# Altium schematic symbol library SG2002_QFN88_Library.SchLib: 1 symbol
Pins are listed as number, name and electrical type; pins without a type are passive.

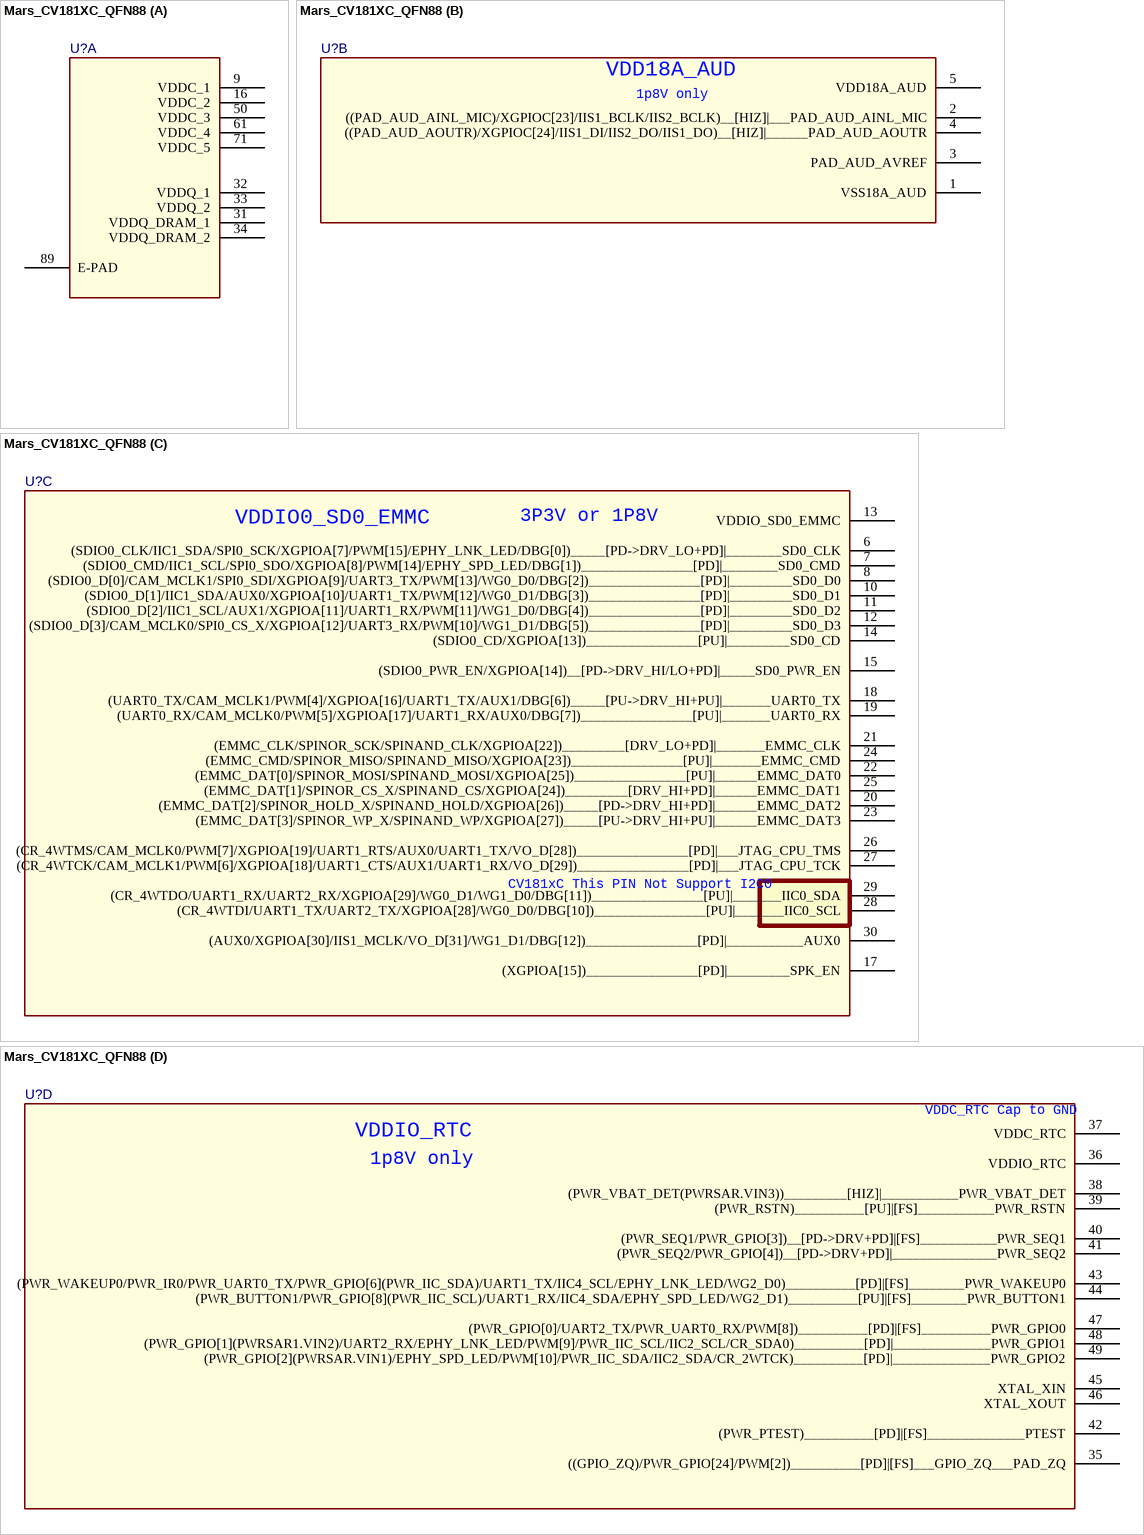
[diagram p0: symbol Mars_CV181XC_QFN88]

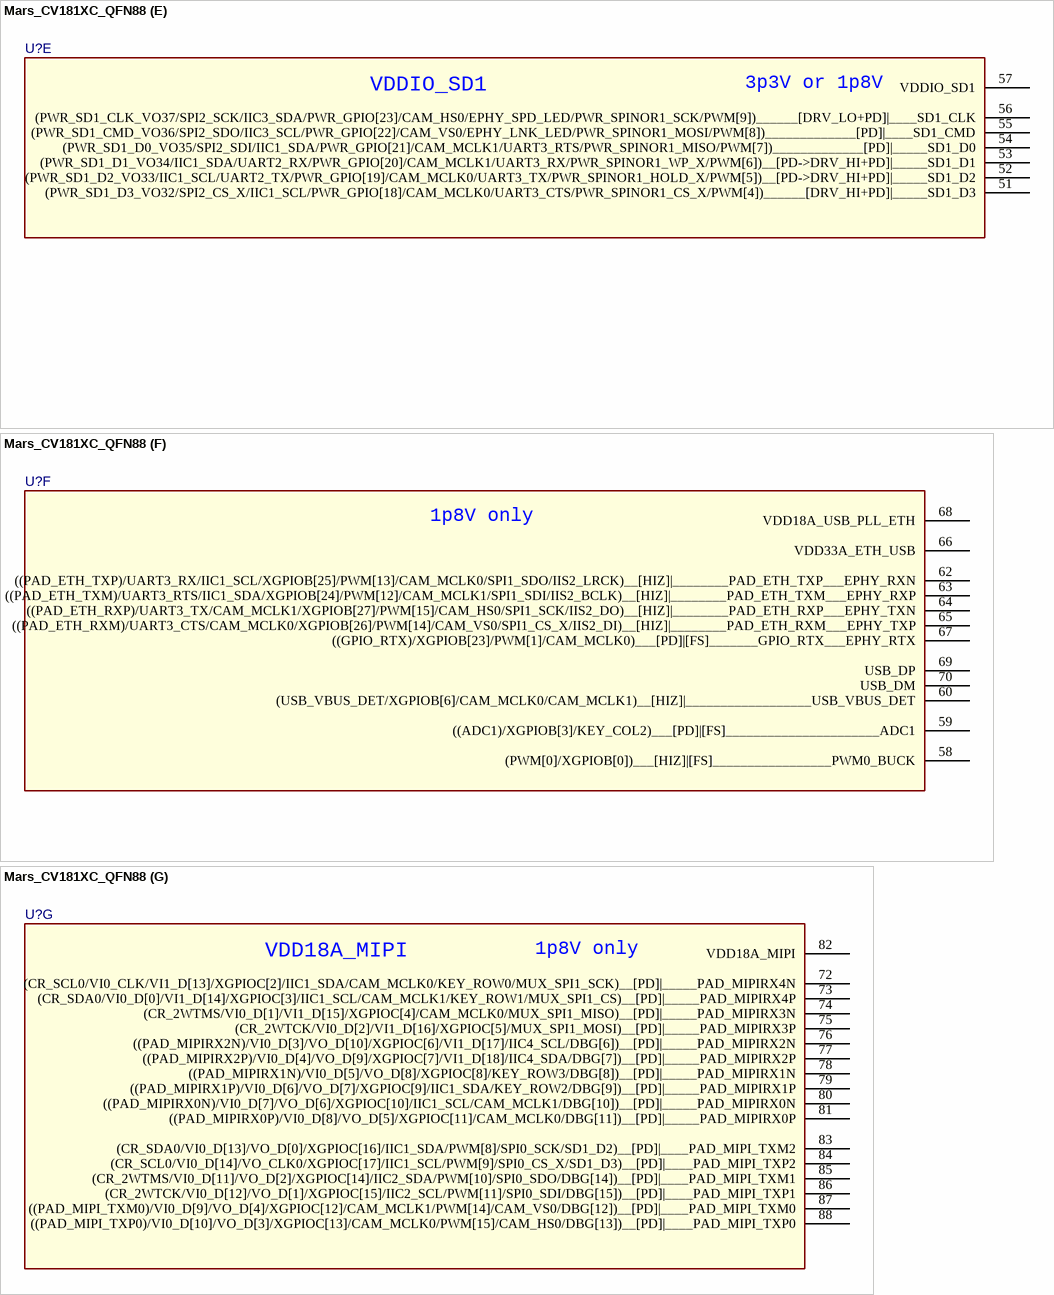
[diagram p1: symbol Mars_CV181XC_QFN88]

## Mars_CV181XC_QFN88
designator U?
SWAP_INFO: (S1+S2+S3+S4+S5+S6+S7); SPLIT_INST: TRUE
part A pins: 9 VDDC_1 (power), 16 VDDC_2 (power), 31 VDDQ_DRAM_1 (power), 32 VDDQ_1 (power), 33 VDDQ_2 (power), 34 VDDQ_DRAM_2 (power), 50 VDDC_3 (power), 61 VDDC_4 (power), 71 VDDC_5 (power), 89 E-PAD (power)
part B pins: 1 VSS18A_AUD, 2 ((PAD_AUD_AINL_MIC)/XGPIOC[23]/IIS1_BCLK/IIS2_BCLK)__[HIZ]|___PAD_AUD_AINL_MIC, 3 PAD_AUD_AVREF, 4 ((PAD_AUD_AOUTR)/XGPIOC[24]/IIS1_DI/IIS2_DO/IIS1_DO)__[HIZ]|______PAD_AUD_AOUTR, 5 VDD18A_AUD (power)
part C pins: 6 (SDIO0_CLK/IIC1_SDA/SPI0_SCK/XGPIOA[7]/PWM[15]/EPHY_LNK_LED/DBG[0])_____[PD->DRV_LO+PD]|________SD0_CLK, 7 (SDIO0_CMD/IIC1_SCL/SPI0_SDO/XGPIOA[8]/PWM[14]/EPHY_SPD_LED/DBG[1])________________[PD]|________SD0_CMD, 8 (SDIO0_D[0]/CAM_MCLK1/SPI0_SDI/XGPIOA[9]/UART3_TX/PWM[13]/WG0_D0/DBG[2])________________[PD]|_________SD0_D0, 10 (SDIO0_D[1]/IIC1_SDA/AUX0/XGPIOA[10]/UART1_TX/PWM[12]/WG0_D1/DBG[3])________________[PD]|_________SD0_D1, 11 (SDIO0_D[2]/IIC1_SCL/AUX1/XGPIOA[11]/UART1_RX/PWM[11]/WG1_D0/DBG[4])________________[PD]|_________SD0_D2, 12 (SDIO0_D[3]/CAM_MCLK0/SPI0_CS_X/XGPIOA[12]/UART3_RX/PWM[10]/WG1_D1/DBG[5])________________[PD]|_________SD0_D3, 13 VDDIO_SD0_EMMC (power), 14 (SDIO0_CD/XGPIOA[13])________________[PU]|_________SD0_CD, 15 (SDIO0_PWR_EN/XGPIOA[14])__[PD->DRV_HI/LO+PD]|_____SD0_PWR_EN, 17 (XGPIOA[15])________________[PD]|_________SPK_EN, 18 (UART0_TX/CAM_MCLK1/PWM[4]/XGPIOA[16]/UART1_TX/AUX1/DBG[6])_____[PU->DRV_HI+PU]|_______UART0_TX, 19 (UART0_RX/CAM_MCLK0/PWM[5]/XGPIOA[17]/UART1_RX/AUX0/DBG[7])________________[PU]|_______UART0_RX, 20 (EMMC_DAT[2]/SPINOR_HOLD_X/SPINAND_HOLD/XGPIOA[26])_____[PD->DRV_HI+PD]|______EMMC_DAT2, 21 (EMMC_CLK/SPINOR_SCK/SPINAND_CLK/XGPIOA[22])_________[DRV_LO+PD]|_______EMMC_CLK, 22 (EMMC_DAT[0]/SPINOR_MOSI/SPINAND_MOSI/XGPIOA[25])________________[PU]|______EMMC_DAT0, 23 (EMMC_DAT[3]/SPINOR_WP_X/SPINAND_WP/XGPIOA[27])_____[PU->DRV_HI+PU]|______EMMC_DAT3, 24 (EMMC_CMD/SPINOR_MISO/SPINAND_MISO/XGPIOA[23])________________[PU]|_______EMMC_CMD, 25 (EMMC_DAT[1]/SPINOR_CS_X/SPINAND_CS/XGPIOA[24])_________[DRV_HI+PD]|______EMMC_DAT1, 26 (CR_4WTMS/CAM_MCLK0/PWM[7]/XGPIOA[19]/UART1_RTS/AUX0/UART1_TX/VO_D[28])________________[PD]|___JTAG_CPU_TMS, 27 (CR_4WTCK/CAM_MCLK1/PWM[6]/XGPIOA[18]/UART1_CTS/AUX1/UART1_RX/VO_D[29])________________[PD]|___JTAG_CPU_TCK, 28 (CR_4WTDI/UART1_TX/UART2_TX/XGPIOA[28]/WG0_D0/DBG[10])________________[PU]|_______IIC0_SCL, 29 (CR_4WTDO/UART1_RX/UART2_RX/XGPIOA[29]/WG0_D1/WG1_D0/DBG[11])________________[PU]|_______IIC0_SDA, 30 (AUX0/XGPIOA[30]/IIS1_MCLK/VO_D[31]/WG1_D1/DBG[12])________________[PD]|___________AUX0
part D pins: 35 ((GPIO_ZQ)/PWR_GPIO[24]/PWM[2])__________[PD]|[FS]___GPIO_ZQ___PAD_ZQ, 36 VDDIO_RTC (power), 37 VDDC_RTC (power), 38 (PWR_VBAT_DET(PWRSAR.VIN3))_________[HIZ]|___________PWR_VBAT_DET, 39 (PWR_RSTN)__________[PU]|[FS]___________PWR_RSTN, 40 (PWR_SEQ1/PWR_GPIO[3])__[PD->DRV+PD]|[FS]___________PWR_SEQ1, 41 (PWR_SEQ2/PWR_GPIO[4])__[PD->DRV+PD]|_______________PWR_SEQ2, 42 (PWR_PTEST)__________[PD]|[FS]______________PTEST, 43 (PWR_WAKEUP0/PWR_IR0/PWR_UART0_TX/PWR_GPIO[6](PWR_IIC_SDA)/UART1_TX/IIC4_SCL/EPHY_LNK_LED/WG2_D0)__________[PD]|[FS]________PWR_WAKEUP0, 44 (PWR_BUTTON1/PWR_GPIO[8](PWR_IIC_SCL)/UART1_RX/IIC4_SDA/EPHY_SPD_LED/WG2_D1)__________[PU]|[FS]________PWR_BUTTON1, 45 XTAL_XIN, 46 XTAL_XOUT, 47 (PWR_GPIO[0]/UART2_TX/PWR_UART0_RX/PWM[8])__________[PD]|[FS]__________PWR_GPIO0, 48 (PWR_GPIO[1](PWRSAR1.VIN2)/UART2_RX/EPHY_LNK_LED/PWM[9]/PWR_IIC_SCL/IIC2_SCL/CR_SDA0)__________[PD]|______________PWR_GPIO1, 49 (PWR_GPIO[2](PWRSAR.VIN1)/EPHY_SPD_LED/PWM[10]/PWR_IIC_SDA/IIC2_SDA/CR_2WTCK)__________[PD]|______________PWR_GPIO2
part E pins: 51 (PWR_SD1_D3_VO32/SPI2_CS_X/IIC1_SCL/PWR_GPIO[18]/CAM_MCLK0/UART3_CTS/PWR_SPINOR1_CS_X/PWM[4])______[DRV_HI+PD]|_____SD1_D3, 52 (PWR_SD1_D2_VO33/IIC1_SCL/UART2_TX/PWR_GPIO[19]/CAM_MCLK0/UART3_TX/PWR_SPINOR1_HOLD_X/PWM[5])__[PD->DRV_HI+PD]|_____SD1_D2, 53 (PWR_SD1_D1_VO34/IIC1_SDA/UART2_RX/PWR_GPIO[20]/CAM_MCLK1/UART3_RX/PWR_SPINOR1_WP_X/PWM[6])__[PD->DRV_HI+PD]|_____SD1_D1, 54 (PWR_SD1_D0_VO35/SPI2_SDI/IIC1_SDA/PWR_GPIO[21]/CAM_MCLK1/UART3_RTS/PWR_SPINOR1_MISO/PWM[7])_____________[PD]|_____SD1_D0, 55 (PWR_SD1_CMD_VO36/SPI2_SDO/IIC3_SCL/PWR_GPIO[22]/CAM_VS0/EPHY_LNK_LED/PWR_SPINOR1_MOSI/PWM[8])_____________[PD]|____SD1_CMD, 56 (PWR_SD1_CLK_VO37/SPI2_SCK/IIC3_SDA/PWR_GPIO[23]/CAM_HS0/EPHY_SPD_LED/PWR_SPINOR1_SCK/PWM[9])______[DRV_LO+PD]|____SD1_CLK, 57 VDDIO_SD1 (power)
part F pins: 58 (PWM[0]/XGPIOB[0])___[HIZ]|[FS]_________________PWM0_BUCK, 59 ((ADC1)/XGPIOB[3]/KEY_COL2)___[PD]|[FS]______________________ADC1, 60 (USB_VBUS_DET/XGPIOB[6]/CAM_MCLK0/CAM_MCLK1)__[HIZ]|__________________USB_VBUS_DET, 62 ((PAD_ETH_TXP)/UART3_RX/IIC1_SCL/XGPIOB[25]/PWM[13]/CAM_MCLK0/SPI1_SDO/IIS2_LRCK)__[HIZ]|________PAD_ETH_TXP___EPHY_RXN, 63 ((PAD_ETH_TXM)/UART3_RTS/IIC1_SDA/XGPIOB[24]/PWM[12]/CAM_MCLK1/SPI1_SDI/IIS2_BCLK)__[HIZ]|________PAD_ETH_TXM___EPHY_RXP, 64 ((PAD_ETH_RXP)/UART3_TX/CAM_MCLK1/XGPIOB[27]/PWM[15]/CAM_HS0/SPI1_SCK/IIS2_DO)__[HIZ]|________PAD_ETH_RXP___EPHY_TXN, 65 ((PAD_ETH_RXM)/UART3_CTS/CAM_MCLK0/XGPIOB[26]/PWM[14]/CAM_VS0/SPI1_CS_X/IIS2_DI)__[HIZ]|________PAD_ETH_RXM___EPHY_TXP, 66 VDD33A_ETH_USB, 67 ((GPIO_RTX)/XGPIOB[23]/PWM[1]/CAM_MCLK0)___[PD]|[FS]_______GPIO_RTX___EPHY_RTX, 68 VDD18A_USB_PLL_ETH (power), 69 USB_DP, 70 USB_DM
part G pins: 72 (CR_SCL0/VI0_CLK/VI1_D[13]/XGPIOC[2]/IIC1_SDA/CAM_MCLK0/KEY_ROW0/MUX_SPI1_SCK)__[PD]|_____PAD_MIPIRX4N, 73 (CR_SDA0/VI0_D[0]/VI1_D[14]/XGPIOC[3]/IIC1_SCL/CAM_MCLK1/KEY_ROW1/MUX_SPI1_CS)__[PD]|_____PAD_MIPIRX4P, 74 (CR_2WTMS/VI0_D[1]/VI1_D[15]/XGPIOC[4]/CAM_MCLK0/MUX_SPI1_MISO)__[PD]|_____PAD_MIPIRX3N, 75 (CR_2WTCK/VI0_D[2]/VI1_D[16]/XGPIOC[5]/MUX_SPI1_MOSI)__[PD]|_____PAD_MIPIRX3P, 76 ((PAD_MIPIRX2N)/VI0_D[3]/VO_D[10]/XGPIOC[6]/VI1_D[17]/IIC4_SCL/DBG[6])__[PD]|_____PAD_MIPIRX2N, 77 ((PAD_MIPIRX2P)/VI0_D[4]/VO_D[9]/XGPIOC[7]/VI1_D[18]/IIC4_SDA/DBG[7])__[PD]|_____PAD_MIPIRX2P, 78 ((PAD_MIPIRX1N)/VI0_D[5]/VO_D[8]/XGPIOC[8]/KEY_ROW3/DBG[8])__[PD]|_____PAD_MIPIRX1N, 79 ((PAD_MIPIRX1P)/VI0_D[6]/VO_D[7]/XGPIOC[9]/IIC1_SDA/KEY_ROW2/DBG[9])__[PD]|_____PAD_MIPIRX1P, 80 ((PAD_MIPIRX0N)/VI0_D[7]/VO_D[6]/XGPIOC[10]/IIC1_SCL/CAM_MCLK1/DBG[10])__[PD]|_____PAD_MIPIRX0N, 81 ((PAD_MIPIRX0P)/VI0_D[8]/VO_D[5]/XGPIOC[11]/CAM_MCLK0/DBG[11])__[PD]|_____PAD_MIPIRX0P, 82 VDD18A_MIPI (power), 83 (CR_SDA0/VI0_D[13]/VO_D[0]/XGPIOC[16]/IIC1_SDA/PWM[8]/SPI0_SCK/SD1_D2)__[PD]|____PAD_MIPI_TXM2, 84 (CR_SCL0/VI0_D[14]/VO_CLK0/XGPIOC[17]/IIC1_SCL/PWM[9]/SPI0_CS_X/SD1_D3)__[PD]|____PAD_MIPI_TXP2, 85 (CR_2WTMS/VI0_D[11]/VO_D[2]/XGPIOC[14]/IIC2_SDA/PWM[10]/SPI0_SDO/DBG[14])__[PD]|____PAD_MIPI_TXM1, 86 (CR_2WTCK/VI0_D[12]/VO_D[1]/XGPIOC[15]/IIC2_SCL/PWM[11]/SPI0_SDI/DBG[15])__[PD]|____PAD_MIPI_TXP1, 87 ((PAD_MIPI_TXM0)/VI0_D[9]/VO_D[4]/XGPIOC[12]/CAM_MCLK1/PWM[14]/CAM_VS0/DBG[12])__[PD]|____PAD_MIPI_TXM0, 88 ((PAD_MIPI_TXP0)/VI0_D[10]/VO_D[3]/XGPIOC[13]/CAM_MCLK0/PWM[15]/CAM_HS0/DBG[13])__[PD]|____PAD_MIPI_TXP0
part B text: 1p8V only
part C text: VDDIO0_SD0_EMMC; 3P3V or 1P8V; CV181xC This PIN Not Support I2C0
part D text: VDDC_RTC Cap to GND; 1p8V only
part E text: 3p3V or 1p8V
part F text: 1p8V only
part G text: 1p8V only